# Altium footprint library Transformers.PcbLib: 1 footprints
Each footprint in its own frame and in the unit in brackets; x right, y up, seen from the top. Pads: shape width x height; smd on the part's side, far side on the other; paste and mask are expansions set on the pad; w line width, h text height; cw(c..) or ccw(c..) is an arc to the next point about the centre after c.

## T1_F401U_3D [mm] "/20261030/H.Y.Pabón"
3D body "F-401U--3DModel-STEP-884787.STEP": height 47.62, standoff -47.62, extent -43.65,-52.387 76.67,52.387